# Altium footprint library Master.PcbLib: 178 footprints (part 12 of 12)
Each footprint in its own frame and in the unit in brackets; x right, y up, seen from the top. Pads: shape width x height; smd on the part's side, far side on the other; paste and mask are expansions set on the pad; w line width, h text height; cw(c..) or ccw(c..) is an arc to the next point about the centre after c.
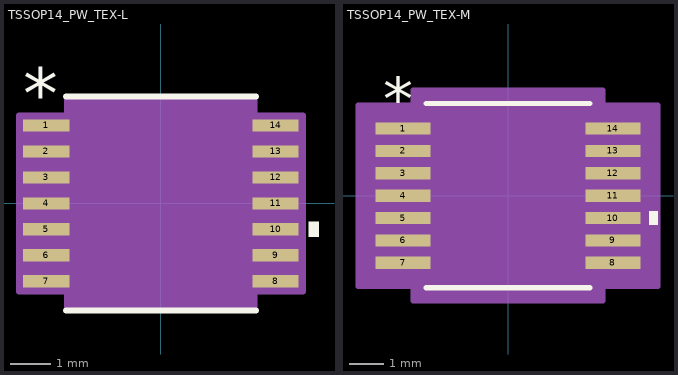
[diagram p11: the footprints below, top view; thin cyan lines are the x and y axes]

## TSSOP14_PW_TEX-L [mil]
pads (14):
  rect 45.75x12 smd paste+0 mask+0: 1(-113.03,76.77) 2(-113.03,51.18) 3(-113.03,25.59) 4(-113.03,0) 5(-113.03,-25.59) 6(-113.03,-51.18) 7(-113.03,-76.77) 8(113.03,-76.77) 9(113.03,-51.18) 10(113.03,-25.59) 11(113.03,0) 12(113.03,25.59) 13(113.03,51.18) 14(113.03,76.77)
Top Overlay:
  region: 145.91,-18.09 155.91,-18.09 155.91,-33.09 145.91,-33.09
  lines w6: -93.5,-105.5 93.5,-105.5 ; -93.5,105.5 93.5,105.5
  text "*" at -135.53,83.77 h50
  text ".Designator" at -137.5,-25 h50
Mechanical 13:
  lines w1: -12,100.5 ccw(c0,100.5) 12,100.5 ; -130,-82.77 -88.5,-82.77 -88.5,-70.77 -130,-70.77 -130,-82.77 ; -130,-57.18 -88.5,-57.18 -88.5,-45.18 -130,-45.18 -130,-57.18 ; -130,-31.59 -88.5,-31.59 -88.5,-19.59 -130,-19.59 -130,-31.59 ; -130,-6 -88.5,-6 -88.5,6 -130,6 -130,-6 ; -130,19.59 -88.5,19.59 -88.5,31.59 -130,31.59 -130,19.59 ; -130,45.18 -88.5,45.18 -88.5,57.18 -130,57.18 -130,45.18 ; -130,70.77 -88.5,70.77 -88.5,82.77 -130,82.77 -130,70.77 ; -88.5,-100.5 -88.5,100.5 88.5,100.5 88.5,-100.5 -88.5,-100.5 ; 88.5,-82.77 130,-82.77 130,-70.77 88.5,-70.77 88.5,-82.77 ; 88.5,-57.18 130,-57.18 130,-45.18 88.5,-45.18 88.5,-57.18 ; 88.5,-31.59 130,-31.59 130,-19.59 88.5,-19.59 88.5,-31.59 ; 88.5,-6 130,-6 130,6 88.5,6 88.5,-6 ; 88.5,19.59 130,19.59 130,31.59 88.5,31.59 88.5,19.59 ; 88.5,45.18 130,45.18 130,57.18 88.5,57.18 88.5,45.18 ; 88.5,70.77 130,70.77 130,82.77 88.5,82.77 88.5,70.77
  text ".Designator" at -137.5,-25 h50
  text "*" at -86,47.5 h50
Top Courtyard:
  region: -92.5,-86.77 -139.91,-86.77 -139.91,86.77 -92.5,86.77 -92.5,104.5 92.5,104.5 92.5,86.77 139.91,86.77 139.91,-86.77 92.5,-86.77 92.5,-104.5 -92.5,-104.5
  lines w6: -139.91,-86.77 -92.5,-86.77 -92.5,-104.5 92.5,-104.5 92.5,-86.77 139.91,-86.77 139.91,86.77 92.5,86.77 92.5,104.5 -92.5,104.5 -92.5,86.77 -139.91,86.77 -139.91,-86.77
3D body "TSSOP14_PW_TEX.step": height 47.09, standoff 0, extent -130,-100.51 130,100.51

## TSSOP14_PW_TEX-M [mm]
pads (14):
  rect 1.604x0.355 smd paste+0 mask+0: 1(-3.05,1.95) 2(-3.05,1.3) 3(-3.05,0.65) 4(-3.05,0) 5(-3.05,-0.65) 6(-3.05,-1.3) 7(-3.05,-1.95) 8(3.05,-1.95) 9(3.05,-1.3) 10(3.05,-0.65) 11(3.05,0) 12(3.05,0.65) 13(3.05,1.3) 14(3.05,1.95)
Top Overlay:
  region: 4.106,-0.459 4.36,-0.459 4.36,-0.84 4.106,-0.84
  lines w0.152: -2.375,-2.68 2.375,-2.68 ; -2.375,2.68 2.375,2.68
  text ".Designator" at -3.492,-0.635 h1.27
  text "*" at -3.621,2.178 h1.27
Mechanical 13:
  lines w0.025: -0.305,2.553 ccw(c0,2.553) 0.305,2.553 ; -3.302,-2.102 -3.302,-1.798 -2.248,-1.798 -2.248,-2.102 -3.302,-2.102 ; -3.302,-1.452 -3.302,-1.148 -2.248,-1.148 -2.248,-1.452 -3.302,-1.452 ; -3.302,-0.802 -3.302,-0.498 -2.248,-0.498 -2.248,-0.802 -3.302,-0.802 ; -3.302,-0.152 -3.302,0.152 -2.248,0.152 -2.248,-0.152 -3.302,-0.152 ; -3.302,0.498 -3.302,0.802 -2.248,0.802 -2.248,0.498 -3.302,0.498 ; -3.302,1.148 -3.302,1.452 -2.248,1.452 -2.248,1.148 -3.302,1.148 ; -3.302,1.798 -3.302,2.102 -2.248,2.102 -2.248,1.798 -3.302,1.798 ; -2.248,-2.553 2.248,-2.553 2.248,2.553 -2.248,2.553 -2.248,-2.553 ; 2.248,-2.102 2.248,-1.798 3.302,-1.798 3.302,-2.102 2.248,-2.102 ; 2.248,-1.452 2.248,-1.148 3.302,-1.148 3.302,-1.452 2.248,-1.452 ; 2.248,-0.802 2.248,-0.498 3.302,-0.498 3.302,-0.802 2.248,-0.802 ; 2.248,-0.152 2.248,0.152 3.302,0.152 3.302,-0.152 2.248,-0.152 ; 2.248,0.498 2.248,0.802 3.302,0.802 3.302,0.498 2.248,0.498 ; 2.248,1.148 2.248,1.452 3.302,1.452 3.302,1.148 2.248,1.148 ; 2.248,1.798 2.248,2.102 3.302,2.102 3.302,1.798 2.248,1.798
  text "*" at -2.184,1.206 h1.27
  text ".Designator" at -3.492,-0.635 h1.27
Top Courtyard:
  region: -2.756,-2.635 -4.36,-2.635 -4.36,2.635 -2.756,2.635 -2.756,3.061 2.756,3.061 2.756,2.635 4.36,2.635 4.36,-2.635 2.756,-2.635 2.756,-3.061 -2.756,-3.061
  lines w0.152: -4.36,-2.635 -4.36,2.635 -2.756,2.635 -2.756,3.061 2.756,3.061 2.756,2.635 4.36,2.635 4.36,-2.635 2.756,-2.635 2.756,-3.061 -2.756,-3.061 -2.756,-2.635 -4.36,-2.635
3D body "TSSOP14_PW_TEX.step": height 1.2, standoff 0, extent -3.302,-2.553 3.302,2.553